# Altium schematic symbol library CF14JT3K00.SchLib: 1 symbol
Pins are listed as number, name and electrical type; pins without a type are passive.

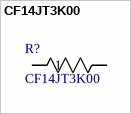
[diagram p0: symbol CF14JT3K00]

## CF14JT3K00
designator R?
Description; Manufacturer_Name: Stackpole International; Copyright: Copyright (C) 2025 Ultra Librarian. All rights reserved.; Manufacturer_Part_Number: CF14JT3K00
footprint STA_CF14_STP
pins: 1, 2